# Altium schematic symbol library BUTTON.SchLib: 2 symbols
Pins are listed as number, name and electrical type; pins without a type are passive.

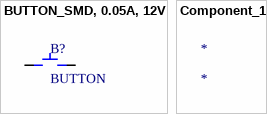
[diagram p0: symbols BUTTON_SMD, 0.05A, 12V to Component_1]

## BUTTON_SMD, 0.05A, 12V
designator B?, comment BUTTON
Switch Tactile N.O. SPST Round Button Gull Wing 0.05A 12VDC 100000Cycles 1.77N SMD T/R; Manufacturer: C&K Components; Manufacturer Part Number: PTS647SM50SMTR2LFS; Contact Resistance: 100mΩ; Electrical Life: 100kcycles; Max Current Rating: 50mA; Max Voltage Rating (DC): 12V; Number of Positions: 1; Operating Force: 2.26N; MADE BY: HOANGBEU; Supplier: DigiKey; Supplier Part Number: 108-PTS647SM50SMTR2LFSCT-ND; RoHS: Compliant; Category: Tactile Switches; Stock: 16284; Pricing: 1=0.3, 10=0.257, 25=0.24, 100=0.2151, 250=0.19936, 500=0.18812 (USD); Export Control Classification Number (ECCN) Code: EAR99; Height: 2.9mm; Harmonized Tariff Schedule (HTS) Code: 8536.50.90.40; Insulation Resistance: 100MΩ; Introduction Date: 2019-06-11; Length: 4.5mm; Lifecycle Status: Production; Max Operating Temperature: 70°C; Min Operating Temperature: -40°C; REACH SVHC: Yes; Schedule B: 8536509065, 8536509065|8536509065, 8536509065|8536509065|8536509065, 8536509065|8536509065|8536509065|8536509065; Termination: Solder; Throw Configuration: SPST; ComponentLink1URL: https://datasheet.octopart.com:443/PTS647SM50SMTR2LFS-C%26K-Components-datasheet-180017464.pdf?src-supplier=IHS; ComponentLink1Description: https://datasheet.octopart.com:443/PTS647SM50SMTR2LFS-C%26K-Components-datasheet-180017464.pdf?src-supplier=IHS; ComponentLink2URL: https://datasheet.octopart.com:443/PTS647SM50SMTR2LFS-C%26K-Components-datasheet-117317067.pdf?src-supplier=Future+Electronics; ComponentLink2Description: https://datasheet.octopart.com:443/PTS647SM50SMTR2LFS-C%26K-Components-datasheet-117317067.pdf?src-supplier=Future+Electronics; ComponentLink3URL: https://datasheet.octopart.com:443/PTS647SM50SMTR2LFS-C%26K-Components-datasheet-145017121.pdf?src-supplier=Electro+Sonic; ComponentLink3Description: https://datasheet.octopart.com:443/PTS647SM50SMTR2LFS-C%26K-Components-datasheet-145017121.pdf?src-supplier=Electro+Sonic; ComponentLink4URL: https://datasheet.octopart.com:443/PTS-647-SM50-SMTR2-LFS-C%26K-Components-datasheet-119449707.pdf?src-supplier=RS+(Formerly+Allied+Electronics); ComponentLink4Description: https://datasheet.octopart.com:443/PTS-647-SM50-SMTR2-LFS-C%26K-Components-datasheet-119449707.pdf?src-supplier=RS+(Formerly+Allied+Electronics); ComponentLink5Description: LINK SP; ComponentLink5URL: https://www.digikey.vn/en/products/detail/c-k/PTS647SM50SMTR2-LFS/9649858; ComponentLink6Description: MADE BY; ComponentLink6URL: HOANGBEU; LINK SP: https://www.digikey.vn/en/products/detail/c-k/PTS647SM50SMTR2-LFS/9649858; LINK MUA: https://linhkien.cxtvn.com/11090-nut-nhan-smd-4p-45x45x5mm-10c.html
footprint SW_PTS_647_SN50_SMTR2_LFS
pins: 1, 2

## Component_1
designator *